# Altium schematic symbol library Transformers-LIB-SCH.SchLib: 4 symbols
Pins are listed as number, name and electrical type; pins without a type are passive.

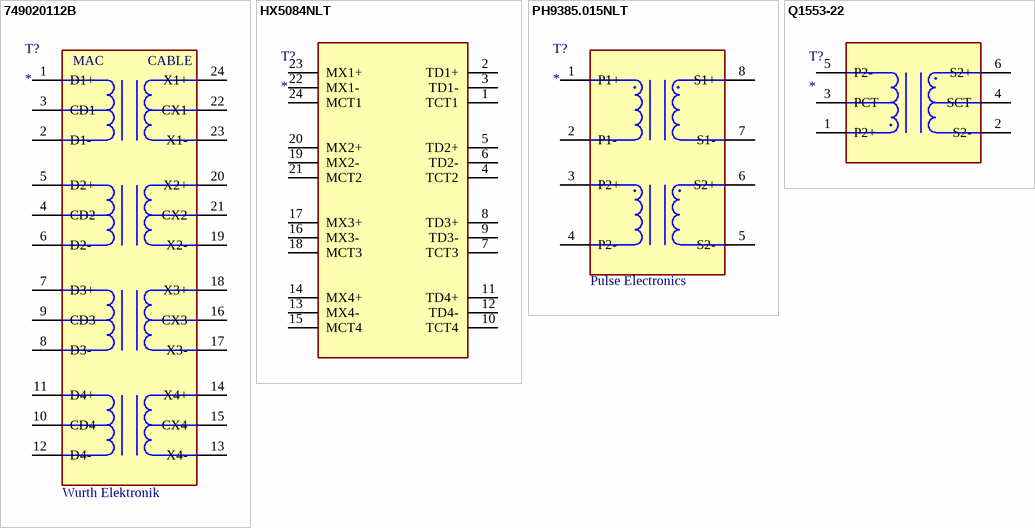
[diagram p0: symbols 749020112B to Q1553-22]

## 749020112B
designator T?  Manufacturer: Wurth Elektronik
350µH LAN Pulse Transformer 1CT:1CT Transmitter, 1CT:1CT Receiver Surface Mount; Manufacturer Part Number: 749020112B; Supply Voltage: 1.5k VRMS; Est Price INR: 828.37; Population Status: YES; Datasheet Link: https://www.we-online.com/catalog/datasheet/749020112B.pdf; Height: 2.39mm; Supplier Part Number: 710-749020112B; Package: SMD; Supplier: Mouser; Temperature Range: -40 to 105; Max Current: -; Weight: 650mg
footprint 749020112B
pins: 1 D1+, 2 D1-, 3 CD1, 4 CD2, 5 D2+, 6 D2-, 7 D3+, 8 D3-, 9 CD3, 10 CD4, 11 D4+, 12 D4-, 13 X4-, 14 X4+, 15 CX4, 16 CX3, 17 X3-, 18 X3+, 19 X2-, 20 X2+, 21 CX2, 22 CX1, 23 X1-, 24 X1+
text: MAC; CABLE

## HX5084NLT
designator T?
Ethernet Signal Transformer; Manufacturer: YAGEO; Manufacturer Part Number: HX5084NLT; Population Status: YES; Datasheet Link: https://productfinder.pulseelectronics.com/api/open/part-attachments/datasheet/hx5084nlt; Height: 4.1402mm; Supplier Part Number: 673-HX5084NLT
footprint HX5084NLT
pins: 1 TCT1, 2 TD1+, 3 TD1-, 4 TCT2, 5 TD2+, 6 TD2-, 7 TCT3, 8 TD3+, 9 TD3-, 10 TCT4, 11 TD4+, 12 TD4-, 13 MX4-, 14 MX4+, 15 MCT4, 16 MX3-, 17 MX3+, 18 MCT3, 19 MX2-, 20 MX2+, 21 MCT2, 22 MX1-, 23 MX1+, 24 MCT1

## PH9385.015NLT
designator T?  Manufacturer: Pulse Electronics
Pulse Transformers 1.35mH 4kV Iso 1:5 70Vus; Manufacturer Part Number: PH9385.015NLT; Est Price INR: 314.95; Population Status: YES; Datasheet Link: https://www.we-online.com/catalog/datasheet/749020112B.pdf; Height: 7.5mm; Supplier Part Number: 673-PH9385015NLT; Package: SMD 17x16x7.5mm; Supplier: Mouser; Temperature Range: -40 to 125; Max Current: -; Supply Voltage: -; Weight: 2.5g
footprint PH9385015NLT
pins: 1 P1+, 2 P1-, 3 P2+, 4 P2-, 5 S2-, 6 S2+, 7 S1-, 8 S1+

## Q1553-22
designator T?
Pulse Transformers TRANSFORMER PBC QPL THT MIL-STD-1553; Manufacturer: iNRCORE; Manufacturer Part Number: Q1553-51; Est Price INR: 5369.96; Population Status: YES; Datasheet Link: https://componentsearchengine.com/Datasheets/1/Q1553-51.pdf; Height: 6.35mm; Package: Through Hole; Supplier Part Number: 673-Q1553-22; Supplier: Mouser; Temperature Range: -55 to 130; Weight: 5g
footprint Q155351
pins: 1 P2+, 2 S2-, 3 PCT, 4 SCT, 5 P2-, 6 S2+